# Altium footprint library 6Cnts SMT.PcbLib: 1 footprints
Each footprint in its own frame and in the unit in brackets; x right, y up, seen from the top. Pads: shape width x height; smd on the part's side, far side on the other; paste and mask are expansions set on the pad; w line width, h text height; cw(c..) or ccw(c..) is an arc to the next point about the centre after c.
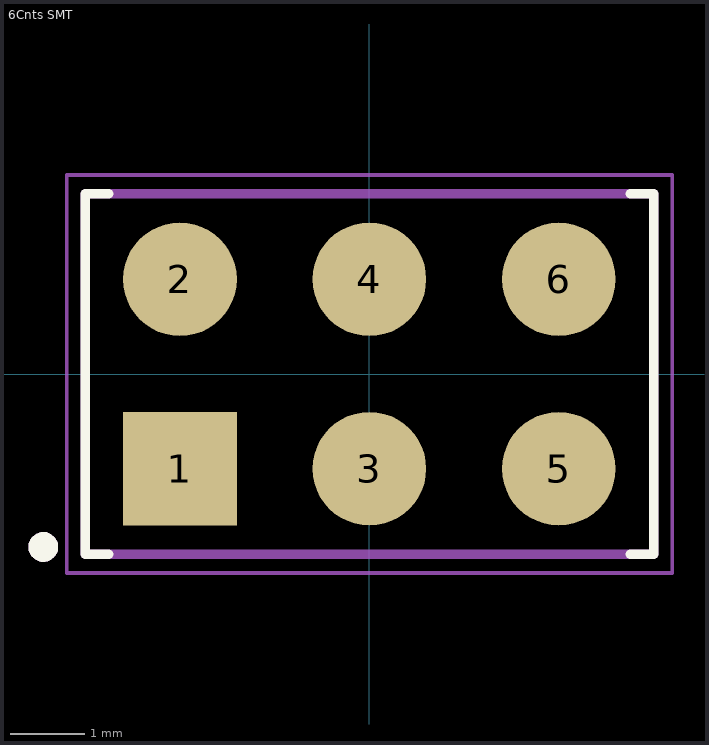
[diagram p0: the footprint, top view; thin cyan lines are the x and y axes]

## 6Cnts SMT [mil] "6Cnts SMT"
pads (6):
  rect 60x60 smd: 1(-100,-50)
  round 60 smd: 2(-100,50) 3(0,-50) 4(0,50) 5(100,-50) 6(100,50)
Top Overlay:
  circle w7.87: c-172.17,-91.3 r3.94
  lines w5: -137.6,-95.08 -150,-95.08 -150,95.08 -137.6,95.08 ; 137.6,-95.08 150,-95.08 150,95.08 137.6,95.08
Mechanical 13:
  circle w7.87: c-172.17,-91.3 r3.94
  lines w5: -150,-95.08 -150,95.08 150,95.08 150,-95.08 -150,-95.08
Mechanical 15:
  lines w1.97: -159.84,-105 159.84,-105 159.84,105 -159.84,105 -159.84,-105
3D body "6Cnts SMT.STEP": height 324.87, standoff 2.04, extent -142.13,-95.08 142.13,95.08